# Altium footprint library Connector_127mm.PcbLib: 27 footprints (part 2 of 2)
Each footprint in its own frame and in the unit in brackets; x right, y up, seen from the top. Pads: shape width x height; smd on the part's side, far side on the other; paste and mask are expansions set on the pad; w line width, h text height; cw(c..) or ccw(c..) is an arc to the next point about the centre after c.
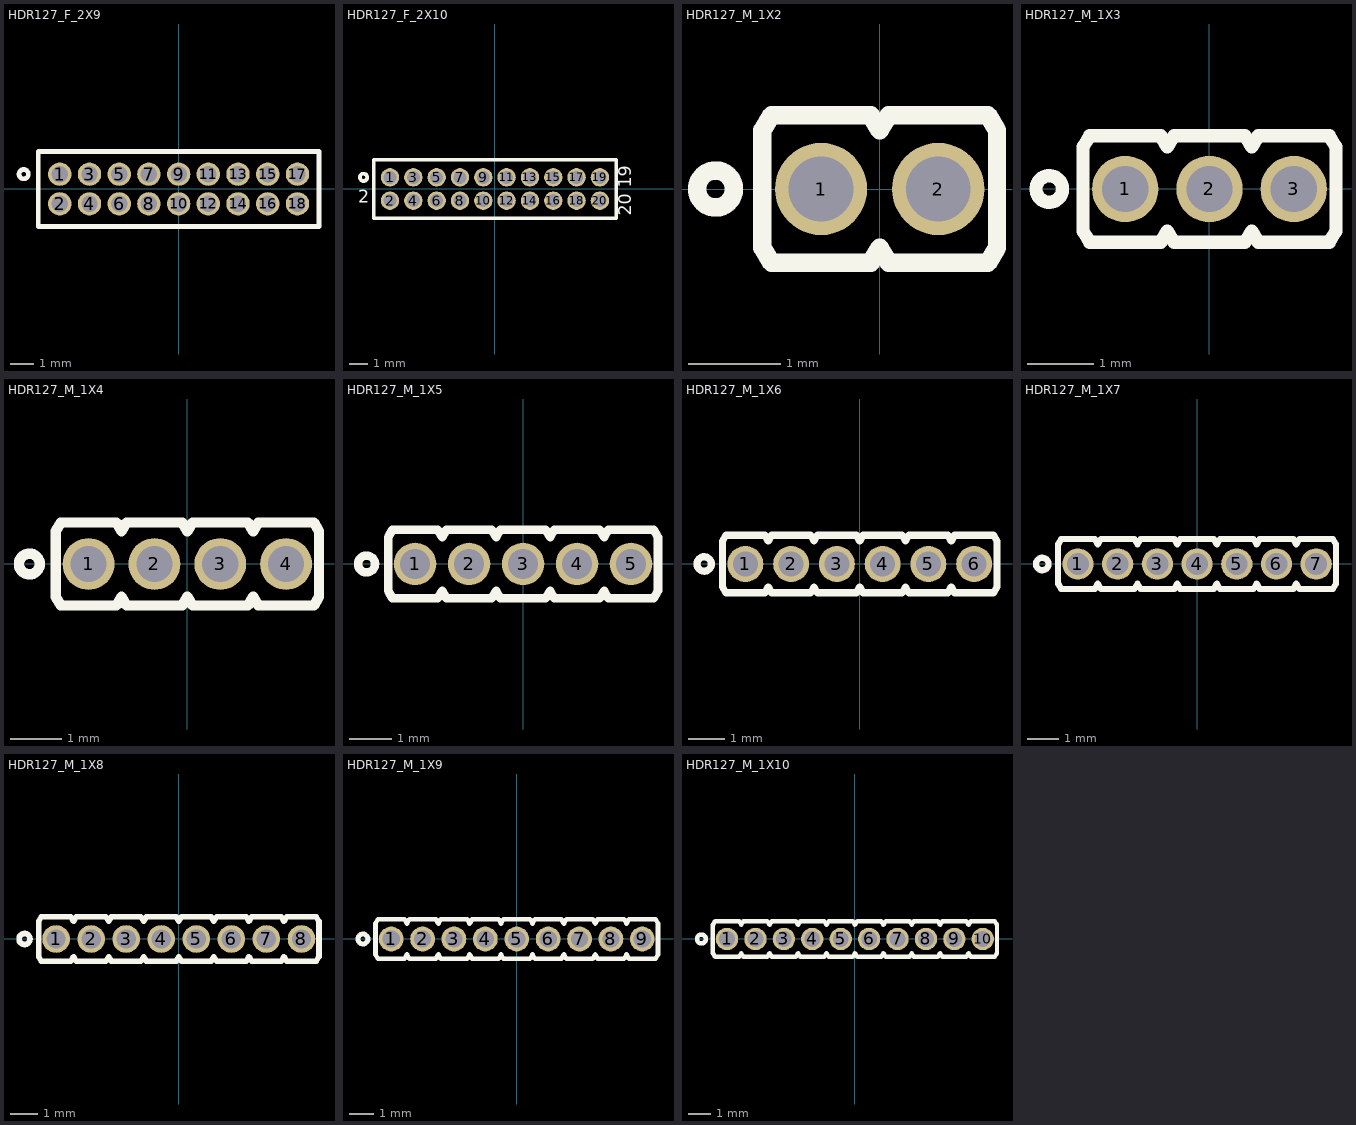
[diagram p1: the footprints below, top view; thin cyan lines are the x and y axes]

## HDR127_F_2X9 [mm] "mini header (50mil pitch)"
pads (18):
  round 1 hole 0.7 mask+0.05: 1(-5.08,0.635) 2(-5.08,-0.635) 3(-3.81,0.635) 4(-3.81,-0.635) 5(-2.54,0.635) 6(-2.54,-0.635) 7(-1.27,0.635) 8(-1.27,-0.635) 9(0,0.635) 10(0,-0.635) 11(1.27,0.635) 12(1.27,-0.635) 13(2.54,0.635) 14(2.54,-0.635) 15(3.81,0.635) 16(3.81,-0.635) 17(5.08,0.635) 18(5.08,-0.635)
Top Overlay:
  circle w0.2: c-6.623,0.635 r0.2
  lines w0.2: -6,-1.6 -6,1.6 6,1.6 6,-1.6 -6,-1.6
3D body "female_header_a-bl127-eg-g09d.stp": height 3.45, standoff -2.35, extent -5.915,-0.265 5.915,1.535
3D body "female_header_a-bl127-eg-g09d.stp": height 3.45, standoff -2.35, extent -5.915,-1.535 5.915,0.265

## HDR127_F_2X10 [mm] "mini header (50mil pitch)"
pads (20):
  round 1 hole 0.7 mask+0.05: 1(-5.715,0.635) 2(-5.715,-0.635) 3(-4.445,0.635) 4(-4.445,-0.635) 5(-3.175,0.635) 6(-3.175,-0.635) 7(-1.905,0.635) 8(-1.905,-0.635) 9(-0.635,0.635) 10(-0.635,-0.635) 11(0.635,0.635) 12(0.635,-0.635) 13(1.905,0.635) 14(1.905,-0.635) 15(3.175,0.635) 16(3.175,-0.635) 17(4.445,0.635) 18(4.445,-0.635) 19(5.715,0.635) 20(5.715,-0.635)
Top Overlay:
  circle w0.2: c-7.158,0.635 r0.2
  lines w0.2: -6.6,-1.6 6.6,-1.6 6.6,1.6 -6.6,1.6 -6.6,-1.6
  text "20" at 7.679,-1.457 h1.2
  text "19" at 7.679,0.07 h1.2
  text "2" at -7.458,-0.986 h1.2
3D body "female_header_a-bl127-eg-g10d.stp": height 3.45, standoff -2.35, extent -6.55,-1.535 6.55,0.265
3D body "female_header_a-bl127-eg-g10d.stp": height 3.45, standoff -2.35, extent -6.55,-0.265 6.55,1.535

## HDR127_M_1X2 [mm] "mini header (50mil pitch)"
pads (2):
  round 1 / inner round 1 / far side oval 1x1.4 hole 0.7 mask+0.05: 1(-0.635,0) 2(0.635,0)
Top Overlay:
  circle w0.2: c-1.778,0 r0.2
  lines w0.2: -1.27,-0.635 -1.171,-0.8 -0.099,-0.8 0,-0.635 0.099,-0.8 1.171,-0.8 1.27,-0.635 1.27,0.635 1.171,0.8 0.099,0.8 0,0.635 -0.099,0.8 -1.171,0.8 -1.27,0.635 -1.27,-0.635
3D body: height 7.3, standoff -2.5, extent -0.835,-0.2 -0.435,0.2
3D body: height 2.8, standoff 0, extent -1.27,-0.635 0,0.635
3D body: height 2.8, standoff 0, extent 0,-0.635 1.27,0.635
3D body: height 7.3, standoff -2.5, extent 0.435,-0.2 0.835,0.2

## HDR127_M_1X3 [mm] "mini header (50mil pitch)"
pads (3):
  round 1 / inner round 1 / far side oval 1x1.4 hole 0.7 mask+0.05: 1(-1.27,0) 2(0,0) 3(1.27,0)
Top Overlay:
  circle w0.2: c-2.413,0 r0.2
  lines w0.2: -1.905,-0.635 -1.905,0.635 -1.806,0.8 -0.734,0.8 -0.635,0.635 -0.536,0.8 0.536,0.8 0.635,0.635 0.734,0.8 1.806,0.8 1.905,0.635 1.905,-0.635 1.806,-0.8 0.734,-0.8 0.635,-0.635 0.536,-0.8 -0.536,-0.8 -0.635,-0.635 -0.734,-0.8 -1.806,-0.8 -1.905,-0.635
3D body: height 2.8, standoff 0, extent -1.905,-0.635 -0.635,0.635
3D body: height 7.3, standoff -2.5, extent -1.47,-0.2 -1.07,0.2
3D body: height 2.8, standoff 0, extent -0.635,-0.635 0.635,0.635
3D body: height 7.3, standoff -2.5, extent -0.2,-0.2 0.2,0.2
3D body: height 2.8, standoff 0, extent 0.635,-0.635 1.905,0.635
3D body: height 7.3, standoff -2.5, extent 1.07,-0.2 1.47,0.2

## HDR127_M_1X4 [mm] "mini header (50mil pitch)"
pads (4):
  round 1 / inner round 1 / far side oval 1x1.4 hole 0.7 mask+0.05: 1(-1.905,0) 2(-0.635,0) 3(0.635,0) 4(1.905,0)
Top Overlay:
  circle w0.2: c-3.048,0 r0.2
  lines w0.2: -2.54,-0.635 -2.54,0.635 -2.441,0.8 -1.369,0.8 -1.27,0.635 -1.171,0.8 -0.099,0.8 0,0.635 0.099,0.8 1.171,0.8 1.27,0.635 1.369,0.8 2.441,0.8 2.54,0.635 2.54,-0.635 2.441,-0.8 1.369,-0.8 1.27,-0.635 1.171,-0.8 0.099,-0.8 0,-0.635 -0.099,-0.8 -1.171,-0.8 -1.27,-0.635 -1.369,-0.8 -2.441,-0.8 -2.54,-0.635
3D body: height 2.8, standoff 0, extent -2.54,-0.635 -1.27,0.635
3D body: height 7.3, standoff -2.5, extent -2.105,-0.2 -1.705,0.2
3D body: height 2.8, standoff 0, extent 1.27,-0.635 2.54,0.635
3D body: height 7.3, standoff -2.5, extent 1.705,-0.2 2.105,0.2
3D body: height 2.8, standoff 0, extent 0,-0.635 1.27,0.635
3D body: height 7.3, standoff -2.5, extent 0.435,-0.2 0.835,0.2
3D body: height 2.8, standoff 0, extent -1.27,-0.635 0,0.635
3D body: height 7.3, standoff -2.5, extent -0.835,-0.2 -0.435,0.2

## HDR127_M_1X5 [mm] "mini header (50mil pitch)"
pads (5):
  round 1 / inner round 1 / far side oval 1x1.4 hole 0.7 mask+0.05: 1(-2.54,0) 2(-1.27,0) 3(0,0) 4(1.27,0) 5(2.54,0)
Top Overlay:
  circle w0.2: c-3.683,0 r0.2
  lines w0.2: -3.175,-0.635 -3.175,0.635 -3.076,0.8 -2.004,0.8 -1.905,0.635 -1.806,0.8 -0.734,0.8 -0.635,0.635 -0.536,0.8 0.536,0.8 0.635,0.635 0.734,0.8 1.806,0.8 1.905,0.635 2.004,0.8 3.076,0.8 3.175,0.635 3.175,-0.635 3.076,-0.8 2.004,-0.8 1.905,-0.635 1.806,-0.8 0.734,-0.8 0.635,-0.635 0.536,-0.8 -0.536,-0.8 -0.635,-0.635 -0.734,-0.8 -1.806,-0.8 -1.905,-0.635 -2.004,-0.8 -3.076,-0.8 -3.175,-0.635
3D body: height 2.8, standoff 0, extent -3.175,-0.635 -1.905,0.635
3D body: height 7.3, standoff -2.5, extent -2.74,-0.2 -2.34,0.2
3D body: height 2.8, standoff 0, extent 1.905,-0.635 3.175,0.635
3D body: height 7.3, standoff -2.5, extent 2.34,-0.2 2.74,0.2
3D body: height 2.8, standoff 0, extent 0.635,-0.635 1.905,0.635
3D body: height 7.3, standoff -2.5, extent 1.07,-0.2 1.47,0.2
3D body: height 2.8, standoff 0, extent -0.635,-0.635 0.635,0.635
3D body: height 7.3, standoff -2.5, extent -0.2,-0.2 0.2,0.2
3D body: height 2.8, standoff 0, extent -1.905,-0.635 -0.635,0.635
3D body: height 7.3, standoff -2.5, extent -1.47,-0.2 -1.07,0.2

## HDR127_M_1X6 [mm] "mini header (50mil pitch)"
pads (6):
  round 1 / inner round 1 / far side oval 1x1.4 hole 0.7 mask+0.05: 1(-3.175,0) 2(-1.905,0) 3(-0.635,0) 4(0.635,0) 5(1.905,0) 6(3.175,0)
Top Overlay:
  circle w0.2: c-4.318,0 r0.2
  lines w0.2: -3.81,-0.635 -3.711,-0.8 -2.639,-0.8 -2.54,-0.635 -2.441,-0.8 -1.369,-0.8 -1.27,-0.635 -1.171,-0.8 -0.099,-0.8 0,-0.635 0.099,-0.8 1.171,-0.8 1.27,-0.635 1.369,-0.8 2.441,-0.8 2.54,-0.635 2.639,-0.8 3.711,-0.8 3.81,-0.635 3.81,0.635 3.711,0.8 2.639,0.8 2.54,0.635 2.441,0.8 1.369,0.8 1.27,0.635 1.171,0.8 0.099,0.8 0,0.635 -0.099,0.8 -1.171,0.8 -1.27,0.635 -1.369,0.8 -2.441,0.8 -2.54,0.635 -2.639,0.8 -3.711,0.8 -3.81,0.635 -3.81,-0.635
3D body: height 2.8, standoff 0, extent -2.54,-0.635 -1.27,0.635
3D body: height 7.3, standoff -2.5, extent -2.105,-0.2 -1.705,0.2
3D body: height 2.8, standoff 0, extent -1.27,-0.635 0,0.635
3D body: height 7.3, standoff -2.5, extent -0.835,-0.2 -0.435,0.2
3D body: height 2.8, standoff 0, extent 0,-0.635 1.27,0.635
3D body: height 7.3, standoff -2.5, extent 0.435,-0.2 0.835,0.2
3D body: height 2.8, standoff 0, extent 1.27,-0.635 2.54,0.635
3D body: height 7.3, standoff -2.5, extent 1.705,-0.2 2.105,0.2
3D body: height 2.8, standoff 0, extent 2.54,-0.635 3.81,0.635
3D body: height 7.3, standoff -2.5, extent 2.975,-0.2 3.375,0.2
3D body: height 7.3, standoff -2.5, extent -3.375,-0.2 -2.975,0.2
3D body: height 2.8, standoff 0, extent -3.81,-0.635 -2.54,0.635

## HDR127_M_1X7 [mm] "mini header (50mil pitch)"
pads (7):
  round 1 / inner round 1 / far side oval 1x1.4 hole 0.7 mask+0.05: 1(-3.81,0) 2(-2.54,0) 3(-1.27,0) 4(0,0) 5(1.27,0) 6(2.54,0) 7(3.81,0)
Top Overlay:
  circle w0.2: c-4.953,0 r0.2
  lines w0.2: -4.445,-0.635 -4.445,0.635 -4.346,0.8 -3.274,0.8 -3.175,0.635 -3.076,0.8 -2.004,0.8 -1.905,0.635 -1.806,0.8 -0.734,0.8 -0.635,0.635 -0.536,0.8 0.536,0.8 0.635,0.635 0.734,0.8 1.806,0.8 1.905,0.635 2.004,0.8 3.076,0.8 3.175,0.635 3.274,0.8 4.346,0.8 4.445,0.635 4.445,-0.635 4.346,-0.8 3.274,-0.8 3.175,-0.635 3.076,-0.8 2.004,-0.8 1.905,-0.635 1.806,-0.8 0.734,-0.8 0.635,-0.635 0.536,-0.8 -0.536,-0.8 -0.635,-0.635 -0.734,-0.8 -1.806,-0.8 -1.905,-0.635 -2.004,-0.8 -3.076,-0.8 -3.175,-0.635 -3.274,-0.8 -4.346,-0.8 -4.445,-0.635
3D body: height 2.8, standoff 0, extent -4.445,-0.635 -3.175,0.635
3D body: height 7.3, standoff -2.5, extent -4.01,-0.2 -3.61,0.2
3D body: height 2.8, standoff 0, extent 3.175,-0.635 4.445,0.635
3D body: height 7.3, standoff -2.5, extent 3.61,-0.2 4.01,0.2
3D body: height 7.3, standoff -2.5, extent 2.34,-0.2 2.74,0.2
3D body: height 2.8, standoff 0, extent 1.905,-0.635 3.175,0.635
3D body: height 7.3, standoff -2.5, extent 1.07,-0.2 1.47,0.2
3D body: height 2.8, standoff 0, extent 0.635,-0.635 1.905,0.635
3D body: height 7.3, standoff -2.5, extent -0.2,-0.2 0.2,0.2
3D body: height 2.8, standoff 0, extent -0.635,-0.635 0.635,0.635
3D body: height 7.3, standoff -2.5, extent -1.47,-0.2 -1.07,0.2
3D body: height 2.8, standoff 0, extent -1.905,-0.635 -0.635,0.635
3D body: height 7.3, standoff -2.5, extent -2.74,-0.2 -2.34,0.2
3D body: height 2.8, standoff 0, extent -3.175,-0.635 -1.905,0.635

## HDR127_M_1X8 [mm] "mini header (50mil pitch)"
pads (8):
  round 1 / inner round 1 / far side oval 1x1.4 hole 0.7 mask+0.05: 1(-4.445,0) 2(-3.175,0) 3(-1.905,0) 4(-0.635,0) 5(0.635,0) 6(1.905,0) 7(3.175,0) 8(4.445,0)
Top Overlay:
  circle w0.2: c-5.588,0 r0.2
  lines w0.2: -5.08,-0.635 -4.981,-0.8 -3.909,-0.8 -3.81,-0.635 -3.711,-0.8 -2.639,-0.8 -2.54,-0.635 -2.441,-0.8 -1.369,-0.8 -1.27,-0.635 -1.171,-0.8 -0.099,-0.8 0,-0.635 0.099,-0.8 1.171,-0.8 1.27,-0.635 1.369,-0.8 2.441,-0.8 2.54,-0.635 2.639,-0.8 3.711,-0.8 3.81,-0.635 3.909,-0.8 4.981,-0.8 5.08,-0.635 5.08,0.635 4.981,0.8 3.909,0.8 3.81,0.635 3.711,0.8 2.639,0.8 2.54,0.635 2.441,0.8 1.369,0.8 1.27,0.635 1.171,0.8 0.099,0.8 0,0.635 -0.099,0.8 -1.171,0.8 -1.27,0.635 -1.369,0.8 -2.441,0.8 -2.54,0.635 -2.639,0.8 -3.711,0.8 -3.81,0.635 -3.909,0.8 -4.981,0.8 -5.08,0.635 -5.08,-0.635
3D body: height 2.8, standoff 0, extent -3.81,-0.635 -2.54,0.635
3D body: height 7.3, standoff -2.5, extent -3.375,-0.2 -2.975,0.2
3D body: height 2.8, standoff 0, extent -2.54,-0.635 -1.27,0.635
3D body: height 7.3, standoff -2.5, extent -2.105,-0.2 -1.705,0.2
3D body: height 2.8, standoff 0, extent -1.27,-0.635 0,0.635
3D body: height 7.3, standoff -2.5, extent -0.835,-0.2 -0.435,0.2
3D body: height 2.8, standoff 0, extent 0,-0.635 1.27,0.635
3D body: height 7.3, standoff -2.5, extent 0.435,-0.2 0.835,0.2
3D body: height 2.8, standoff 0, extent 1.27,-0.635 2.54,0.635
3D body: height 7.3, standoff -2.5, extent 1.705,-0.2 2.105,0.2
3D body: height 7.3, standoff -2.5, extent 2.975,-0.2 3.375,0.2
3D body: height 2.8, standoff 0, extent 2.54,-0.635 3.81,0.635
3D body: height 7.3, standoff -2.5, extent 4.245,-0.2 4.645,0.2
3D body: height 2.8, standoff 0, extent 3.81,-0.635 5.08,0.635
3D body: height 7.3, standoff -2.5, extent -4.645,-0.2 -4.245,0.2
3D body: height 2.8, standoff 0, extent -5.08,-0.635 -3.81,0.635

## HDR127_M_1X9 [mm] "mini header (50mil pitch)"
pads (9):
  round 1 / inner round 1 / far side oval 1x1.4 hole 0.7 mask+0.05: 1(-5.08,0) 2(-3.81,0) 3(-2.54,0) 4(-1.27,0) 5(0,0) 6(1.27,0) 7(2.54,0) 8(3.81,0) 9(5.08,0)
Top Overlay:
  circle w0.2: c-6.223,0 r0.2
  lines w0.2: -5.715,-0.635 -5.616,-0.8 -4.544,-0.8 -4.445,-0.635 -4.346,-0.8 -3.274,-0.8 -3.175,-0.635 -3.076,-0.8 -2.004,-0.8 -1.905,-0.635 -1.806,-0.8 -0.734,-0.8 -0.635,-0.635 -0.536,-0.8 0.536,-0.8 0.635,-0.635 0.734,-0.8 1.806,-0.8 1.905,-0.635 2.004,-0.8 3.076,-0.8 3.175,-0.635 3.274,-0.8 4.346,-0.8 4.445,-0.635 4.544,-0.8 5.616,-0.8 5.715,-0.635 5.715,0.635 5.616,0.8 4.544,0.8 4.445,0.635 4.346,0.8 3.274,0.8 3.175,0.635 3.076,0.8 2.004,0.8 1.905,0.635 1.806,0.8 0.734,0.8 0.635,0.635 0.536,0.8 -0.536,0.8 -0.635,0.635 -0.734,0.8 -1.806,0.8 -1.905,0.635 -2.004,0.8 -3.076,0.8 -3.175,0.635 -3.274,0.8 -4.346,0.8 -4.445,0.635 -4.544,0.8 -5.616,0.8 -5.715,0.635 -5.715,-0.635
3D body: height 7.3, standoff -2.5, extent -5.28,-0.2 -4.88,0.2
3D body: height 2.8, standoff 0, extent -5.715,-0.635 -4.445,0.635
3D body: height 7.3, standoff -2.5, extent -4.01,-0.2 -3.61,0.2
3D body: height 2.8, standoff 0, extent -4.445,-0.635 -3.175,0.635
3D body: height 7.3, standoff -2.5, extent -2.74,-0.2 -2.34,0.2
3D body: height 2.8, standoff 0, extent -3.175,-0.635 -1.905,0.635
3D body: height 7.3, standoff -2.5, extent -1.47,-0.2 -1.07,0.2
3D body: height 2.8, standoff 0, extent -1.905,-0.635 -0.635,0.635
3D body: height 7.3, standoff -2.5, extent -0.2,-0.2 0.2,0.2
3D body: height 2.8, standoff 0, extent -0.635,-0.635 0.635,0.635
3D body: height 7.3, standoff -2.5, extent 1.07,-0.2 1.47,0.2
3D body: height 2.8, standoff 0, extent 0.635,-0.635 1.905,0.635
3D body: height 7.3, standoff -2.5, extent 2.34,-0.2 2.74,0.2
3D body: height 2.8, standoff 0, extent 1.905,-0.635 3.175,0.635
3D body: height 7.3, standoff -2.5, extent 3.61,-0.2 4.01,0.2
3D body: height 2.8, standoff 0, extent 3.175,-0.635 4.445,0.635
3D body: height 7.3, standoff -2.5, extent 4.88,-0.2 5.28,0.2
3D body: height 2.8, standoff 0, extent 4.445,-0.635 5.715,0.635

## HDR127_M_1X10 [mm] "mini header (50mil pitch)"
pads (10):
  round 1 / inner round 1 / far side oval 1x1.4 hole 0.7 mask+0.05: 1(-5.715,0) 2(-4.445,0) 3(-3.175,0) 4(-1.905,0) 5(-0.635,0) 6(0.635,0) 7(1.905,0) 8(3.175,0) 9(4.445,0) 10(5.715,0)
Top Overlay:
  circle w0.2: c-6.858,0 r0.2
  lines w0.2: -6.35,-0.635 -6.251,-0.8 -5.179,-0.8 -5.08,-0.635 -4.981,-0.8 -3.909,-0.8 -3.81,-0.635 -3.711,-0.8 -2.639,-0.8 -2.54,-0.635 -2.441,-0.8 -1.369,-0.8 -1.27,-0.635 -1.171,-0.8 -0.099,-0.8 0,-0.635 0.099,-0.8 1.171,-0.8 1.27,-0.635 1.369,-0.8 2.441,-0.8 2.54,-0.635 2.639,-0.8 3.711,-0.8 3.81,-0.635 3.909,-0.8 4.981,-0.8 5.08,-0.635 5.179,-0.8 6.251,-0.8 6.35,-0.635 6.35,0.635 6.251,0.8 5.179,0.8 5.08,0.635 4.981,0.8 3.909,0.8 3.81,0.635 3.711,0.8 2.639,0.8 2.54,0.635 2.441,0.8 1.369,0.8 1.27,0.635 1.171,0.8 0.099,0.8 0,0.635 -0.099,0.8 -1.171,0.8 -1.27,0.635 -1.369,0.8 -2.441,0.8 -2.54,0.635 -2.639,0.8 -3.711,0.8 -3.81,0.635 -3.909,0.8 -4.981,0.8 -5.08,0.635 -5.179,0.8 -6.251,0.8 -6.35,0.635 -6.35,-0.635
3D body: height 7.3, standoff -2.5, extent 5.515,-0.2 5.915,0.2
3D body: height 2.8, standoff 0, extent 5.08,-0.635 6.35,0.635
3D body: height 7.3, standoff -2.5, extent -5.915,-0.2 -5.515,0.2
3D body: height 2.8, standoff 0, extent -6.35,-0.635 -5.08,0.635
3D body: height 7.3, standoff -2.5, extent -4.645,-0.2 -4.245,0.2
3D body: height 2.8, standoff 0, extent -5.08,-0.635 -3.81,0.635
3D body: height 7.3, standoff -2.5, extent -3.375,-0.2 -2.975,0.2
3D body: height 2.8, standoff 0, extent -3.81,-0.635 -2.54,0.635
3D body: height 7.3, standoff -2.5, extent -2.105,-0.2 -1.705,0.2
3D body: height 2.8, standoff 0, extent -2.54,-0.635 -1.27,0.635
3D body: height 7.3, standoff -2.5, extent -0.835,-0.2 -0.435,0.2
3D body: height 2.8, standoff 0, extent -1.27,-0.635 0,0.635
3D body: height 7.3, standoff -2.5, extent 0.435,-0.2 0.835,0.2
3D body: height 2.8, standoff 0, extent 0,-0.635 1.27,0.635
3D body: height 7.3, standoff -2.5, extent 1.705,-0.2 2.105,0.2
3D body: height 2.8, standoff 0, extent 1.27,-0.635 2.54,0.635
3D body: height 7.3, standoff -2.5, extent 2.975,-0.2 3.375,0.2
3D body: height 2.8, standoff 0, extent 2.54,-0.635 3.81,0.635
3D body: height 7.3, standoff -2.5, extent 4.245,-0.2 4.645,0.2
3D body: height 2.8, standoff 0, extent 3.81,-0.635 5.08,0.635